# Altium footprint library MY_LIB_Connectors_CONNFLY.PcbLib: 239 footprints (part 3 of 15)
Each footprint in its own frame and in the unit in brackets; x right, y up, seen from the top. Pads: shape width x height; smd on the part's side, far side on the other; paste and mask are expansions set on the pad; w line width, h text height; cw(c..) or ccw(c..) is an arc to the next point about the centre after c.
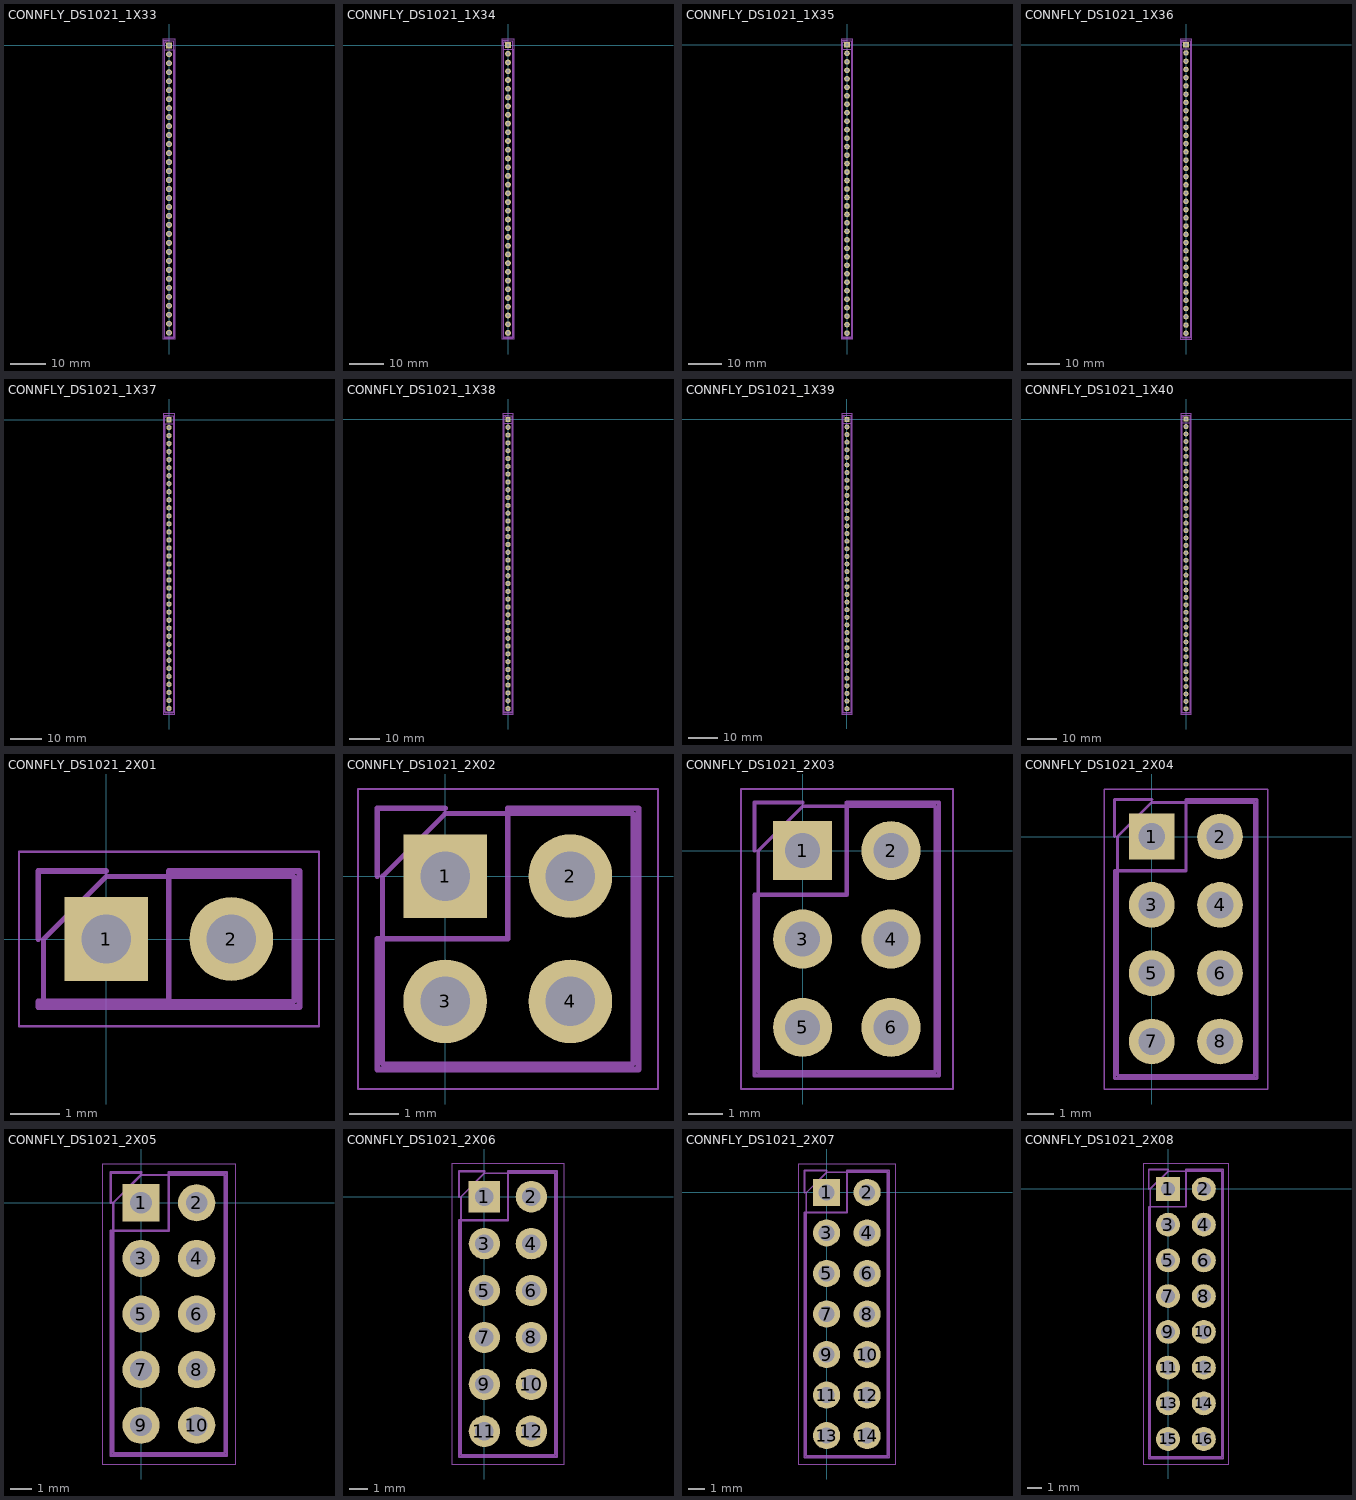
[diagram p2: the footprints below, top view; thin cyan lines are the x and y axes]

## CONNFLY_DS1021_1X33 [mm] "Connfly DS1021 1x33 standard KiCad; PTH1.0 pad1.7 pitch2.54; CC-BY-SA-4.0; STEP generic"
height 8.54
pads (33):
  rect 1.7x1.7 hole 1 paste-2539.97 mask+0.05: 1(0,0)
  round 1.7 hole 1 paste-2539.97 mask+0.05: 2(0,-2.54) 3(0,-5.08) 4(0,-7.62) 5(0,-10.16) 6(0,-12.7) 7(0,-15.24) 8(0,-17.78) 9(0,-20.32) 10(0,-22.86) 11(0,-25.4) 12(0,-27.94) 13(0,-30.48) 14(0,-33.02) 15(0,-35.56) 16(0,-38.1) 17(0,-40.64) 18(0,-43.18) 19(0,-45.72) 20(0,-48.26) 21(0,-50.8) 22(0,-53.34) 23(0,-55.88) 24(0,-58.42) 25(0,-60.96) 26(0,-63.5) 27(0,-66.04) 28(0,-68.58) 29(0,-71.12) 30(0,-73.66) 31(0,-76.2) 32(0,-78.74) 33(0,-81.28)
Mechanical 15:
  lines w0.05: -1.77,-83.05 -1.77,1.77 1.77,1.77 1.77,-83.05 -1.77,-83.05
  lines w0.1: -1.27,-82.55 -1.27,0.635 -0.635,1.27 1.27,1.27 1.27,-82.55 -1.27,-82.55
  lines w0.12: -1.38,0 -1.38,1.38 0,1.38 ; -1.38,-82.66 -1.38,-1.27 1.38,-1.27 1.38,-82.66 -1.38,-82.66
3D body "PinHeader_1x33_P2.54mm_Vertical.step": height 8.54, standoff -3, extent -1.27,-82.55 1.27,1.27

## CONNFLY_DS1021_1X34 [mm] "Connfly DS1021 1x34 standard KiCad; PTH1.0 pad1.7 pitch2.54; CC-BY-SA-4.0; STEP generic"
height 8.54
pads (34):
  rect 1.7x1.7 hole 1 paste-2539.97 mask+0.05: 1(0,0)
  round 1.7 hole 1 paste-2539.97 mask+0.05: 2(0,-2.54) 3(0,-5.08) 4(0,-7.62) 5(0,-10.16) 6(0,-12.7) 7(0,-15.24) 8(0,-17.78) 9(0,-20.32) 10(0,-22.86) 11(0,-25.4) 12(0,-27.94) 13(0,-30.48) 14(0,-33.02) 15(0,-35.56) 16(0,-38.1) 17(0,-40.64) 18(0,-43.18) 19(0,-45.72) 20(0,-48.26) 21(0,-50.8) 22(0,-53.34) 23(0,-55.88) 24(0,-58.42) 25(0,-60.96) 26(0,-63.5) 27(0,-66.04) 28(0,-68.58) 29(0,-71.12) 30(0,-73.66) 31(0,-76.2) 32(0,-78.74) 33(0,-81.28) 34(0,-83.82)
Mechanical 15:
  lines w0.05: -1.77,-85.59 -1.77,1.77 1.77,1.77 1.77,-85.59 -1.77,-85.59
  lines w0.1: -1.27,-85.09 -1.27,0.635 -0.635,1.27 1.27,1.27 1.27,-85.09 -1.27,-85.09
  lines w0.12: -1.38,0 -1.38,1.38 0,1.38 ; -1.38,-85.2 -1.38,-1.27 1.38,-1.27 1.38,-85.2 -1.38,-85.2
3D body "PinHeader_1x34_P2.54mm_Vertical.step": height 8.54, standoff -3, extent -1.27,-85.09 1.27,1.27

## CONNFLY_DS1021_1X35 [mm] "Connfly DS1021 1x35 standard KiCad; PTH1.0 pad1.7 pitch2.54; CC-BY-SA-4.0; STEP generic"
height 8.54
pads (35):
  rect 1.7x1.7 hole 1 paste-2539.97 mask+0.05: 1(0,0)
  round 1.7 hole 1 paste-2539.97 mask+0.05: 2(0,-2.54) 3(0,-5.08) 4(0,-7.62) 5(0,-10.16) 6(0,-12.7) 7(0,-15.24) 8(0,-17.78) 9(0,-20.32) 10(0,-22.86) 11(0,-25.4) 12(0,-27.94) 13(0,-30.48) 14(0,-33.02) 15(0,-35.56) 16(0,-38.1) 17(0,-40.64) 18(0,-43.18) 19(0,-45.72) 20(0,-48.26) 21(0,-50.8) 22(0,-53.34) 23(0,-55.88) 24(0,-58.42) 25(0,-60.96) 26(0,-63.5) 27(0,-66.04) 28(0,-68.58) 29(0,-71.12) 30(0,-73.66) 31(0,-76.2) 32(0,-78.74) 33(0,-81.28) 34(0,-83.82) 35(0,-86.36)
Mechanical 15:
  lines w0.05: -1.77,-88.13 -1.77,1.77 1.77,1.77 1.77,-88.13 -1.77,-88.13
  lines w0.1: -1.27,-87.63 -1.27,0.635 -0.635,1.27 1.27,1.27 1.27,-87.63 -1.27,-87.63
  lines w0.12: -1.38,0 -1.38,1.38 0,1.38 ; -1.38,-87.74 -1.38,-1.27 1.38,-1.27 1.38,-87.74 -1.38,-87.74
3D body "PinHeader_1x35_P2.54mm_Vertical.step": height 8.54, standoff -3, extent -1.27,-87.63 1.27,1.27

## CONNFLY_DS1021_1X36 [mm] "Connfly DS1021 1x36 standard KiCad; PTH1.0 pad1.7 pitch2.54; CC-BY-SA-4.0; STEP generic"
height 8.54
pads (36):
  rect 1.7x1.7 hole 1 paste-2539.97 mask+0.05: 1(0,0)
  round 1.7 hole 1 paste-2539.97 mask+0.05: 2(0,-2.54) 3(0,-5.08) 4(0,-7.62) 5(0,-10.16) 6(0,-12.7) 7(0,-15.24) 8(0,-17.78) 9(0,-20.32) 10(0,-22.86) 11(0,-25.4) 12(0,-27.94) 13(0,-30.48) 14(0,-33.02) 15(0,-35.56) 16(0,-38.1) 17(0,-40.64) 18(0,-43.18) 19(0,-45.72) 20(0,-48.26) 21(0,-50.8) 22(0,-53.34) 23(0,-55.88) 24(0,-58.42) 25(0,-60.96) 26(0,-63.5) 27(0,-66.04) 28(0,-68.58) 29(0,-71.12) 30(0,-73.66) 31(0,-76.2) 32(0,-78.74) 33(0,-81.28) 34(0,-83.82) 35(0,-86.36) 36(0,-88.9)
Mechanical 15:
  lines w0.05: -1.77,-90.67 -1.77,1.77 1.77,1.77 1.77,-90.67 -1.77,-90.67
  lines w0.1: -1.27,-90.17 -1.27,0.635 -0.635,1.27 1.27,1.27 1.27,-90.17 -1.27,-90.17
  lines w0.12: -1.38,0 -1.38,1.38 0,1.38 ; -1.38,-90.28 -1.38,-1.27 1.38,-1.27 1.38,-90.28 -1.38,-90.28
3D body "PinHeader_1x36_P2.54mm_Vertical.step": height 8.54, standoff -3, extent -1.27,-90.17 1.27,1.27

## CONNFLY_DS1021_1X37 [mm] "Connfly DS1021 1x37 standard KiCad; PTH1.0 pad1.7 pitch2.54; CC-BY-SA-4.0; STEP generic"
height 8.54
pads (37):
  rect 1.7x1.7 hole 1 paste-2539.97 mask+0.05: 1(0,0)
  round 1.7 hole 1 paste-2539.97 mask+0.05: 2(0,-2.54) 3(0,-5.08) 4(0,-7.62) 5(0,-10.16) 6(0,-12.7) 7(0,-15.24) 8(0,-17.78) 9(0,-20.32) 10(0,-22.86) 11(0,-25.4) 12(0,-27.94) 13(0,-30.48) 14(0,-33.02) 15(0,-35.56) 16(0,-38.1) 17(0,-40.64) 18(0,-43.18) 19(0,-45.72) 20(0,-48.26) 21(0,-50.8) 22(0,-53.34) 23(0,-55.88) 24(0,-58.42) 25(0,-60.96) 26(0,-63.5) 27(0,-66.04) 28(0,-68.58) 29(0,-71.12) 30(0,-73.66) 31(0,-76.2) 32(0,-78.74) 33(0,-81.28) 34(0,-83.82) 35(0,-86.36) 36(0,-88.9) 37(0,-91.44)
Mechanical 15:
  lines w0.05: -1.77,-93.21 -1.77,1.77 1.77,1.77 1.77,-93.21 -1.77,-93.21
  lines w0.1: -1.27,-92.71 -1.27,0.635 -0.635,1.27 1.27,1.27 1.27,-92.71 -1.27,-92.71
  lines w0.12: -1.38,0 -1.38,1.38 0,1.38 ; -1.38,-92.82 -1.38,-1.27 1.38,-1.27 1.38,-92.82 -1.38,-92.82
3D body "PinHeader_1x37_P2.54mm_Vertical.step": height 8.54, standoff -3, extent -1.27,-92.71 1.27,1.27

## CONNFLY_DS1021_1X38 [mm] "Connfly DS1021 1x38 standard KiCad; PTH1.0 pad1.7 pitch2.54; CC-BY-SA-4.0; STEP generic"
height 8.54
pads (38):
  rect 1.7x1.7 hole 1 paste-2539.97 mask+0.05: 1(0,0)
  round 1.7 hole 1 paste-2539.97 mask+0.05: 2(0,-2.54) 3(0,-5.08) 4(0,-7.62) 5(0,-10.16) 6(0,-12.7) 7(0,-15.24) 8(0,-17.78) 9(0,-20.32) 10(0,-22.86) 11(0,-25.4) 12(0,-27.94) 13(0,-30.48) 14(0,-33.02) 15(0,-35.56) 16(0,-38.1) 17(0,-40.64) 18(0,-43.18) 19(0,-45.72) 20(0,-48.26) 21(0,-50.8) 22(0,-53.34) 23(0,-55.88) 24(0,-58.42) 25(0,-60.96) 26(0,-63.5) 27(0,-66.04) 28(0,-68.58) 29(0,-71.12) 30(0,-73.66) 31(0,-76.2) 32(0,-78.74) 33(0,-81.28) 34(0,-83.82) 35(0,-86.36) 36(0,-88.9) 37(0,-91.44) 38(0,-93.98)
Mechanical 15:
  lines w0.05: -1.77,-95.75 -1.77,1.77 1.77,1.77 1.77,-95.75 -1.77,-95.75
  lines w0.1: -1.27,-95.25 -1.27,0.635 -0.635,1.27 1.27,1.27 1.27,-95.25 -1.27,-95.25
  lines w0.12: -1.38,0 -1.38,1.38 0,1.38 ; -1.38,-95.36 -1.38,-1.27 1.38,-1.27 1.38,-95.36 -1.38,-95.36
3D body "PinHeader_1x38_P2.54mm_Vertical.step": height 8.54, standoff -3, extent -1.27,-95.25 1.27,1.27

## CONNFLY_DS1021_1X39 [mm] "Connfly DS1021 1x39 standard KiCad; PTH1.0 pad1.7 pitch2.54; CC-BY-SA-4.0; STEP generic"
height 8.54
pads (39):
  rect 1.7x1.7 hole 1 paste-2539.97 mask+0.05: 1(0,0)
  round 1.7 hole 1 paste-2539.97 mask+0.05: 2(0,-2.54) 3(0,-5.08) 4(0,-7.62) 5(0,-10.16) 6(0,-12.7) 7(0,-15.24) 8(0,-17.78) 9(0,-20.32) 10(0,-22.86) 11(0,-25.4) 12(0,-27.94) 13(0,-30.48) 14(0,-33.02) 15(0,-35.56) 16(0,-38.1) 17(0,-40.64) 18(0,-43.18) 19(0,-45.72) 20(0,-48.26) 21(0,-50.8) 22(0,-53.34) 23(0,-55.88) 24(0,-58.42) 25(0,-60.96) 26(0,-63.5) 27(0,-66.04) 28(0,-68.58) 29(0,-71.12) 30(0,-73.66) 31(0,-76.2) 32(0,-78.74) 33(0,-81.28) 34(0,-83.82) 35(0,-86.36) 36(0,-88.9) 37(0,-91.44) 38(0,-93.98) 39(0,-96.52)
Mechanical 15:
  lines w0.05: -1.77,-98.29 -1.77,1.77 1.77,1.77 1.77,-98.29 -1.77,-98.29
  lines w0.1: -1.27,-97.79 -1.27,0.635 -0.635,1.27 1.27,1.27 1.27,-97.79 -1.27,-97.79
  lines w0.12: -1.38,0 -1.38,1.38 0,1.38 ; -1.38,-97.9 -1.38,-1.27 1.38,-1.27 1.38,-97.9 -1.38,-97.9
3D body "PinHeader_1x39_P2.54mm_Vertical.step": height 8.54, standoff -3, extent -1.27,-97.79 1.27,1.27

## CONNFLY_DS1021_1X40 [mm] "Connfly DS1021 1x40 standard KiCad; PTH1.0 pad1.7 pitch2.54; CC-BY-SA-4.0; STEP generic"
height 8.54
pads (40):
  rect 1.7x1.7 hole 1 paste-2539.97 mask+0.05: 1(0,0)
  round 1.7 hole 1 paste-2539.97 mask+0.05: 2(0,-2.54) 3(0,-5.08) 4(0,-7.62) 5(0,-10.16) 6(0,-12.7) 7(0,-15.24) 8(0,-17.78) 9(0,-20.32) 10(0,-22.86) 11(0,-25.4) 12(0,-27.94) 13(0,-30.48) 14(0,-33.02) 15(0,-35.56) 16(0,-38.1) 17(0,-40.64) 18(0,-43.18) 19(0,-45.72) 20(0,-48.26) 21(0,-50.8) 22(0,-53.34) 23(0,-55.88) 24(0,-58.42) 25(0,-60.96) 26(0,-63.5) 27(0,-66.04) 28(0,-68.58) 29(0,-71.12) 30(0,-73.66) 31(0,-76.2) 32(0,-78.74) 33(0,-81.28) 34(0,-83.82) 35(0,-86.36) 36(0,-88.9) 37(0,-91.44) 38(0,-93.98) 39(0,-96.52) 40(0,-99.06)
Mechanical 15:
  lines w0.05: -1.77,-100.83 -1.77,1.77 1.77,1.77 1.77,-100.83 -1.77,-100.83
  lines w0.1: -1.27,-100.33 -1.27,0.635 -0.635,1.27 1.27,1.27 1.27,-100.33 -1.27,-100.33
  lines w0.12: -1.38,0 -1.38,1.38 0,1.38 ; -1.38,-100.44 -1.38,-1.27 1.38,-1.27 1.38,-100.44 -1.38,-100.44
3D body "PinHeader_1x40_P2.54mm_Vertical.step": height 8.54, standoff -3, extent -1.27,-100.33 1.27,1.27

## CONNFLY_DS1021_2X01 [mm] "Connfly DS1021 2x1 standard KiCad; PTH1.0 pad1.7 pitch2.54; CC-BY-SA-4.0; STEP generic"
height 8.54
pads (2):
  rect 1.7x1.7 hole 1 paste-2539.97 mask+0.05: 1(0,0)
  round 1.7 hole 1 paste-2539.97 mask+0.05: 2(2.54,0)
Mechanical 15:
  lines w0.05: -1.77,-1.77 -1.77,1.77 4.32,1.77 4.32,-1.77 -1.77,-1.77
  lines w0.1: -1.27,-1.27 -1.27,0 0,1.27 3.81,1.27 3.81,-1.27 -1.27,-1.27
  lines w0.12: -1.38,0 -1.38,1.38 0,1.38 ; -1.38,-1.38 -1.38,-1.27 1.27,-1.27 1.27,1.38 3.92,1.38 3.92,-1.38 -1.38,-1.38
3D body "PinHeader_2x01_P2.54mm_Vertical.step": height 8.54, standoff -3, extent -1.27,-1.27 3.81,1.27

## CONNFLY_DS1021_2X02 [mm] "Connfly DS1021 2x2 standard KiCad; PTH1.0 pad1.7 pitch2.54; CC-BY-SA-4.0; STEP generic"
height 8.54
pads (4):
  rect 1.7x1.7 hole 1 paste-2539.97 mask+0.05: 1(0,0)
  round 1.7 hole 1 paste-2539.97 mask+0.05: 2(2.54,0) 3(0,-2.54) 4(2.54,-2.54)
Mechanical 15:
  lines w0.05: -1.77,-4.32 -1.77,1.77 4.32,1.77 4.32,-4.32 -1.77,-4.32
  lines w0.1: -1.27,-3.81 -1.27,0 0,1.27 3.81,1.27 3.81,-3.81 -1.27,-3.81
  lines w0.12: -1.38,0 -1.38,1.38 0,1.38 ; -1.38,-3.92 -1.38,-1.27 1.27,-1.27 1.27,1.38 3.92,1.38 3.92,-3.92 -1.38,-3.92
3D body "PinHeader_2x02_P2.54mm_Vertical.step": height 8.54, standoff -3, extent -1.27,-3.81 3.81,1.27

## CONNFLY_DS1021_2X03 [mm] "Connfly DS1021 2x3 standard KiCad; PTH1.0 pad1.7 pitch2.54; CC-BY-SA-4.0; STEP generic"
height 8.54
pads (6):
  rect 1.7x1.7 hole 1 paste-2539.97 mask+0.05: 1(0,0)
  round 1.7 hole 1 paste-2539.97 mask+0.05: 2(2.54,0) 3(0,-2.54) 4(2.54,-2.54) 5(0,-5.08) 6(2.54,-5.08)
Mechanical 15:
  lines w0.05: -1.77,-6.85 -1.77,1.77 4.32,1.77 4.32,-6.85 -1.77,-6.85
  lines w0.1: -1.27,-6.35 -1.27,0 0,1.27 3.81,1.27 3.81,-6.35 -1.27,-6.35
  lines w0.12: -1.38,0 -1.38,1.38 0,1.38 ; -1.38,-6.46 -1.38,-1.27 1.27,-1.27 1.27,1.38 3.92,1.38 3.92,-6.46 -1.38,-6.46
3D body "PinHeader_2x03_P2.54mm_Vertical.step": height 8.54, standoff -3, extent -1.27,-6.35 3.81,1.27

## CONNFLY_DS1021_2X04 [mm] "Connfly DS1021 2x4 standard KiCad; PTH1.0 pad1.7 pitch2.54; CC-BY-SA-4.0; STEP generic"
height 8.54
pads (8):
  rect 1.7x1.7 hole 1 paste-2539.97 mask+0.05: 1(0,0)
  round 1.7 hole 1 paste-2539.97 mask+0.05: 2(2.54,0) 3(0,-2.54) 4(2.54,-2.54) 5(0,-5.08) 6(2.54,-5.08) 7(0,-7.62) 8(2.54,-7.62)
Mechanical 15:
  lines w0.05: -1.77,-9.39 -1.77,1.77 4.32,1.77 4.32,-9.39 -1.77,-9.39
  lines w0.1: -1.27,-8.89 -1.27,0 0,1.27 3.81,1.27 3.81,-8.89 -1.27,-8.89
  lines w0.12: -1.38,0 -1.38,1.38 0,1.38 ; -1.38,-9 -1.38,-1.27 1.27,-1.27 1.27,1.38 3.92,1.38 3.92,-9 -1.38,-9
3D body "PinHeader_2x04_P2.54mm_Vertical.step": height 8.54, standoff -3, extent -1.27,-8.89 3.81,1.27

## CONNFLY_DS1021_2X05 [mm] "Connfly DS1021 2x5 standard KiCad; PTH1.0 pad1.7 pitch2.54; CC-BY-SA-4.0; STEP generic"
height 8.54
pads (10):
  rect 1.7x1.7 hole 1 paste-2539.97 mask+0.05: 1(0,0)
  round 1.7 hole 1 paste-2539.97 mask+0.05: 2(2.54,0) 3(0,-2.54) 4(2.54,-2.54) 5(0,-5.08) 6(2.54,-5.08) 7(0,-7.62) 8(2.54,-7.62) 9(0,-10.16) 10(2.54,-10.16)
Mechanical 15:
  lines w0.05: -1.77,-11.93 -1.77,1.77 4.32,1.77 4.32,-11.93 -1.77,-11.93
  lines w0.1: -1.27,-11.43 -1.27,0 0,1.27 3.81,1.27 3.81,-11.43 -1.27,-11.43
  lines w0.12: -1.38,0 -1.38,1.38 0,1.38 ; -1.38,-11.54 -1.38,-1.27 1.27,-1.27 1.27,1.38 3.92,1.38 3.92,-11.54 -1.38,-11.54
3D body "PinHeader_2x05_P2.54mm_Vertical.step": height 8.54, standoff -3, extent -1.27,-11.43 3.81,1.27

## CONNFLY_DS1021_2X06 [mm] "Connfly DS1021 2x6 standard KiCad; PTH1.0 pad1.7 pitch2.54; CC-BY-SA-4.0; STEP generic"
height 8.54
pads (12):
  rect 1.7x1.7 hole 1 paste-2539.97 mask+0.05: 1(0,0)
  round 1.7 hole 1 paste-2539.97 mask+0.05: 2(2.54,0) 3(0,-2.54) 4(2.54,-2.54) 5(0,-5.08) 6(2.54,-5.08) 7(0,-7.62) 8(2.54,-7.62) 9(0,-10.16) 10(2.54,-10.16) 11(0,-12.7) 12(2.54,-12.7)
Mechanical 15:
  lines w0.05: -1.77,-14.47 -1.77,1.77 4.32,1.77 4.32,-14.47 -1.77,-14.47
  lines w0.1: -1.27,-13.97 -1.27,0 0,1.27 3.81,1.27 3.81,-13.97 -1.27,-13.97
  lines w0.12: -1.38,0 -1.38,1.38 0,1.38 ; -1.38,-14.08 -1.38,-1.27 1.27,-1.27 1.27,1.38 3.92,1.38 3.92,-14.08 -1.38,-14.08
3D body "PinHeader_2x06_P2.54mm_Vertical.step": height 8.54, standoff -3, extent -1.27,-13.97 3.81,1.27

## CONNFLY_DS1021_2X07 [mm] "Connfly DS1021 2x7 standard KiCad; PTH1.0 pad1.7 pitch2.54; CC-BY-SA-4.0; STEP generic"
height 8.54
pads (14):
  rect 1.7x1.7 hole 1 paste-2539.97 mask+0.05: 1(0,0)
  round 1.7 hole 1 paste-2539.97 mask+0.05: 2(2.54,0) 3(0,-2.54) 4(2.54,-2.54) 5(0,-5.08) 6(2.54,-5.08) 7(0,-7.62) 8(2.54,-7.62) 9(0,-10.16) 10(2.54,-10.16) 11(0,-12.7) 12(2.54,-12.7) 13(0,-15.24) 14(2.54,-15.24)
Mechanical 15:
  lines w0.05: -1.77,-17.02 -1.77,1.78 4.32,1.78 4.32,-17.02 -1.77,-17.02
  lines w0.1: -1.27,-16.51 -1.27,0 0,1.27 3.81,1.27 3.81,-16.51 -1.27,-16.51
  lines w0.12: -1.38,0 -1.38,1.38 0,1.38 ; -1.38,-16.62 -1.38,-1.27 1.27,-1.27 1.27,1.38 3.92,1.38 3.92,-16.62 -1.38,-16.62
3D body "PinHeader_2x07_P2.54mm_Vertical.step": height 8.54, standoff -3, extent -1.27,-16.51 3.81,1.27

## CONNFLY_DS1021_2X08 [mm] "Connfly DS1021 2x8 standard KiCad; PTH1.0 pad1.7 pitch2.54; CC-BY-SA-4.0; STEP generic"
height 8.54
pads (16):
  rect 1.7x1.7 hole 1 paste-2539.97 mask+0.05: 1(0,0)
  round 1.7 hole 1 paste-2539.97 mask+0.05: 2(2.54,0) 3(0,-2.54) 4(2.54,-2.54) 5(0,-5.08) 6(2.54,-5.08) 7(0,-7.62) 8(2.54,-7.62) 9(0,-10.16) 10(2.54,-10.16) 11(0,-12.7) 12(2.54,-12.7) 13(0,-15.24) 14(2.54,-15.24) 15(0,-17.78) 16(2.54,-17.78)
Mechanical 15:
  lines w0.05: -1.77,-19.55 -1.77,1.77 4.32,1.77 4.32,-19.55 -1.77,-19.55
  lines w0.1: -1.27,-19.05 -1.27,0 0,1.27 3.81,1.27 3.81,-19.05 -1.27,-19.05
  lines w0.12: -1.38,0 -1.38,1.38 0,1.38 ; -1.38,-19.16 -1.38,-1.27 1.27,-1.27 1.27,1.38 3.92,1.38 3.92,-19.16 -1.38,-19.16
3D body "PinHeader_2x08_P2.54mm_Vertical.step": height 8.54, standoff -3, extent -1.27,-19.05 3.81,1.27